# Altium footprint library Cole_.PcbLib: 175 footprints (part 8 of 11)
Each footprint in its own frame and in the unit in brackets; x right, y up, seen from the top. Pads: shape width x height; smd on the part's side, far side on the other; paste and mask are expansions set on the pad; w line width, h text height; cw(c..) or ccw(c..) is an arc to the next point about the centre after c.
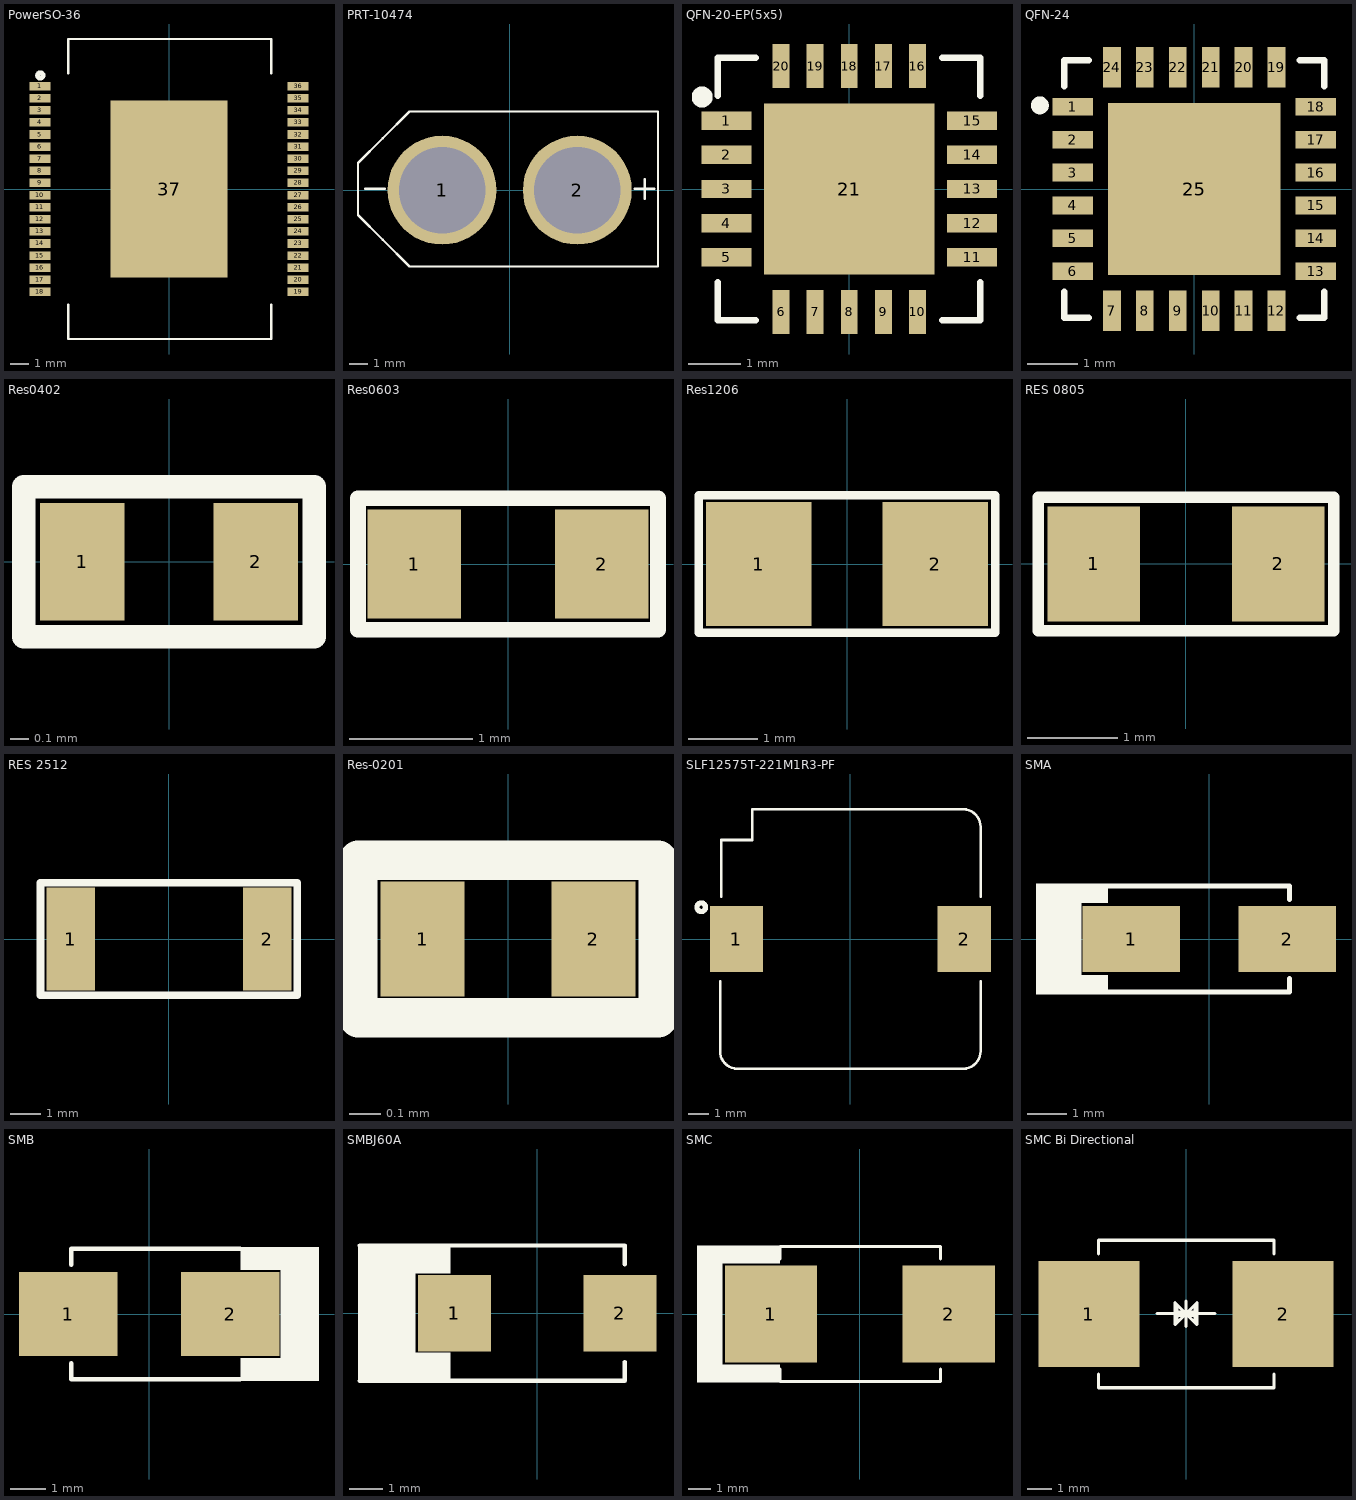
[diagram p7: the footprints below, top view; thin cyan lines are the x and y axes]

## PowerSO-36 [mm]
pads (37):
  rect 1.15x0.46 smd mask+0.055: 1(-6.925,5.525) 2(-6.925,4.875) 3(-6.925,4.225) 4(-6.925,3.575) 5(-6.925,2.925) 6(-6.925,2.275) 7(-6.925,1.625) 8(-6.925,0.975) 9(-6.925,0.325) 10(-6.925,-0.325) 11(-6.925,-0.975) 12(-6.925,-1.625) 13(-6.925,-2.275) 14(-6.925,-2.925) 15(-6.925,-3.575) 16(-6.925,-4.225) 17(-6.925,-4.875) 18(-6.925,-5.525) 19(6.925,-5.525) 20(6.925,-4.875) 21(6.925,-4.225) 22(6.925,-3.575) 23(6.925,-2.925) 24(6.925,-2.275) 25(6.925,-1.625) 26(6.925,-0.975) 27(6.925,-0.325) 28(6.925,0.325) 29(6.925,0.975) 30(6.925,1.625) 31(6.925,2.275) 32(6.925,2.925) 33(6.925,3.575) 34(6.925,4.225) 35(6.925,4.875) 36(6.925,5.525)
  rect 6.3x9.5 smd mask+0.055: 37(0,0)
Top Overlay:
  circle w0.254: c-6.909,6.096 r0.148
  lines w0.127: -5.41,-6.198 -5.41,-8.052 5.486,-8.052 5.486,-6.198 ; -5.41,6.198 -5.41,8.052 5.486,8.052 5.486,6.198
3D body "PowerSO-36_STM.step": height 3.61, standoff 0, extent -7.252,-8.001 7.252,8.001

## PRT-10474 [mm]
pads (2):
  round 5.8 hole 4.6: 1(-3.6,0) 2(3.6,0)
Top Overlay:
  lines w0.127: -7.698,0.076 -6.657,0.076 ; 6.657,0.076 7.698,0.076 ; 7.188,-0.446 7.188,0.596 ; -8.077,-1.321 -6.756,-2.642 -5.334,-4.064 7.899,-4.064 7.899,4.191 -5.334,4.191 -6.756,2.769 -8.077,1.448 -8.077,-1.321
3D body "User Library-XT60 male.step": height 16.3, standoff -4.9, extent -8.051,-4.013 7.849,4.137

## QFN-20-EP(5x5) [mm]
pads (21):
  rect 0.95x0.35 smd: 1(-2.34,1.3) 2(-2.34,0.65) 3(-2.34,0) 4(-2.34,-0.65) 5(-2.34,-1.3) 11(2.34,-1.3) 12(2.34,-0.65) 13(2.34,0) 14(2.34,0.65) 15(2.34,1.3)
  rect 0.32x0.84 smd: 6(-1.3,-2.34) 7(-0.65,-2.34) 8(0,-2.34) 9(0.65,-2.34) 10(1.3,-2.34) 16(1.3,2.34) 17(0.65,2.34) 18(0,2.34) 19(-0.65,2.34) 20(-1.3,2.34)
  rect 3.25x3.25 smd paste-0.595: 21(0,0)
Top Overlay:
  circle w0.2: c-2.801,1.753 r0.1
  lines w0.127: -2.507,-1.78 -2.507,-2.5 -1.787,-2.5 ; -2.507,1.78 -2.507,2.5 -1.787,2.5 ; 1.773,-2.5 2.493,-2.5 2.493,-1.78 ; 1.773,2.5 2.493,2.5 2.493,1.78
3D body "step_temp.STEP": height 0.8, standoff 0, extent -2.5,-2.5 2.5,2.5

## QFN-24 [mm]
pads (25):
  rect 0.8x0.35 smd: 1(-2.4,1.625) 2(-2.4,0.975) 3(-2.4,0.325) 4(-2.4,-0.325) 5(-2.4,-0.975) 6(-2.4,-1.625) 13(2.4,-1.625) 14(2.4,-0.975) 15(2.4,-0.325) 16(2.4,0.325) 17(2.4,0.975) 18(2.4,1.625)
  rect 0.35x0.8 smd: 7(-1.625,-2.4) 8(-0.975,-2.4) 9(-0.325,-2.4) 10(0.325,-2.4) 11(0.975,-2.4) 12(1.625,-2.4) 19(1.625,2.4) 20(0.975,2.4) 21(0.325,2.4) 22(-0.325,2.4) 23(-0.975,2.4) 24(-1.625,2.4)
  rect 3.4x3.4 smd: 25(0,0)
Top Overlay:
  circle w0.2: c-3.048,1.651 r0.076
  lines w0.127: -2.565,-2.032 -2.565,-2.54 -2.083,-2.54 ; -2.565,2.032 -2.565,2.54 -2.083,2.54 ; 2.083,-2.54 2.565,-2.54 2.565,-2.032 ; 2.083,2.54 2.565,2.54 2.565,2.032
3D body "QFN24_BRA.step": height 0.89, standoff 0, extent -2.502,-2.502 2.502,2.502

## Res0402 [mil]
pads (2):
  rect 18x25 smd mask+4: 1(-18.5,0) 2(18.5,0)
Top Overlay:
  lines w0.13: -32,-17 32,-17
  lines w5: -31,-16 31,-16 31,16 -31,16 -31,-16
3D body "User Library-RES_1005-0402.step": height 16.14, standoff 0, extent -22.63,-10.82 22.64,10.83

## Res0603 [mil]
pads (2):
  rect 30x35 smd: 1(-30,0) 2(30,0)
Top Overlay:
  lines w5: -48,-21 48,-21 48,21 -48,21 -48,-21
3D body "User Library-RESC1608X05N.step": height 17.76, standoff 0, extent -30.52,-16.74 30.51,16.73

## Res1206 [mil]
pads (2):
  rect 60x70 smd: 1(-50,0) 2(50,0)
Top Overlay:
  lines w5: -84,-39 -84,39 84,39 84,-39 -84,-39
3D body "User Library-1206 SMD Resistor.step": height 39.45, standoff 0, extent -62.99,-31.49 63,31.51

## RES 0805 [mil] "SMD 0805"
pads (2):
  rect 40x50 smd: 1(-40,0) 2(40,0)
Top Overlay:
  lines w5: -64,-29 -64,29 64,29 64,-29 -64,-29
3D body "User Library-CR2012-0805.STEP": height 23.62, standoff 0, extent -39.34,-24.75 39.4,24.46

## RES 2512 [mm] "0.033O ±1% 2W ±1800ppm/°C 2512 Low Resistors & Current Sense Resistors - Surface Mount RoHS"
pads (2):
  rect 1.6x3.4 smd: 1(-3.25,0) 2(3.25,0)
Top Overlay:
  lines w0.254: -4.242,-1.854 -4.242,1.854 4.237,1.854 4.237,-1.854 -4.242,-1.854
3D body "CircuitWorks-RESISTOR 2512.step": height 0.58, standoff -0.03, extent -3.175,-1.63 3.175,1.63

## Res-0201 [mm]
pads (2):
  rect 0.27x0.37 smd: 1(-0.275,0) 2(0.275,0)
Top Overlay:
  lines w0.127: -0.483,-0.254 -0.483,0.254 0.483,0.254 0.483,-0.254 -0.483,-0.254
3D body "User Library-0201(0603M) Res.step": height 0.29, standoff -0.02, extent -0.305,-0.152 0.305,0.153

## SLF12575T-221M1R3-PF [mm]
pads (2):
  rect 2.6x3.2 smd: 1(-5.55,0) 2(5.55,0)
Top Overlay:
  circle w0.254: c-7.266,1.549 r0.209
  lines w0.127: -6.35,-2.057 -6.35,-5.461 ccw(c-5.499,-5.474) -5.512,-6.325 5.512,-6.325 ccw(c5.499,-5.474) 6.35,-5.461 6.35,-2.057 ; -6.299,2.057 -6.299,4.826 -4.775,4.826 -4.775,6.325 5.512,6.325 cw(c5.499,5.474) 6.35,5.461 6.35,2.057
3D body "slf12575.step": height 7.5, standoff 0, extent -6.275,-6.326 6.325,6.274

## SMA [mm]
pads (2):
  rect 2.5x1.7 smd: 1(-2,0) 2(2,0)
Top Overlay:
  rectangle: -3.3,0.924 -2.596,1.422
  rectangle: -4.445,-1.422 -3.278,1.422
  rectangle: -3.3,-1.422 -2.596,-0.924
  lines w0.127: -2.658,-1.358 2.061,-1.358 2.061,-1.012 ; -2.658,1.358 2.061,1.358 2.061,1.012
3D body "User Library-DO-214AC SMA.step": height 2.4, standoff 0, extent -2.6,-1.3 2.6,1.3

## SMB [mm]
pads (2):
  rect 2.8x2.4 smd: 1(-2.3,0) 2(2.3,0)
Top Overlay:
  rectangle: 2.591,-1.905 4.826,-1.245
  rectangle: 3.734,-1.651 4.826,1.346
  rectangle: 2.591,1.245 4.826,1.905
  lines w0.127: -2.21,-1.397 -2.21,-1.854 2.591,-1.854 ; -2.21,1.397 -2.21,1.854 2.591,1.854
3D body "User Library-DO-214AA SMB.step": height 2.3, standoff 0, extent -2.7,-1.8 2.7,1.8

## SMBJ60A [mm] "TVS DIODE 60V 96.8V DO214AA"
pads (3):
  rect 2.16x2.26 smd: 1(-2.45,0) 1(-2.45,0) 2(2.45,0)
Top Overlay:
  rectangle: -5.309,-2.057 -3.607,2.007
  rectangle: -3.683,1.168 -2.565,2.007
  rectangle: -3.683,-2.007 -2.565,-1.168
  lines w0.127: -5.258,-2.007 2.591,-2.007 2.591,-1.448 ; -5.258,2.007 2.591,2.007 2.591,1.448
3D body "SMBJSeries_LTF.step": height 2.49, standoff 0, extent -2.794,-1.968 2.794,1.968

## SMC [mm]
pads (2):
  rect 4.1x4.3 smd: 1(-3.95,0) 2(3.95,0)
Top Overlay:
  rectangle: -7.239,2.235 -3.556,3.048
  rectangle: -7.239,-3.048 -3.556,-2.235
  rectangle: -7.239,-2.261 -6.096,2.261
  lines w0.127: -3.556,-2.438 -3.556,-2.997 3.581,-2.997 3.581,-2.438 ; -3.556,2.438 -3.556,2.997 3.581,2.997 3.581,2.438
3D body "User Library-DO-214AB-SMC.step": height 2.41, standoff -0.04, extent -3.9,-2.95 3.9,2.95

## SMC Bi Directional [mm]
pads (2):
  rect 4.1x4.3 smd: 1(-3.95,0) 2(3.95,0)
Top Overlay:
  region: 0.356,0.152 0.076,0.152 0.076,-0.127 0.356,-0.127
  rectangle: -0.356,-0.127 -0.076,0.152
  region: 0.457,0.362 0.305,0.362 0.305,-0.305 0.457,-0.305
  rectangle: -0.457,-0.305 -0.305,0.362
  lines w0.127: -3.556,-2.438 -3.556,-2.997 3.581,-2.997 3.581,-2.438 ; -3.556,2.438 -3.556,2.997 3.581,2.997 3.581,2.438 ; -1.181,0.013 -0.445,0.013 ; 0,-0.508 0,0.533 ; 0.445,0.013 1.181,0.013 ; 0,0.013 0.445,-0.432 0.445,0.457 0,0.013 ; 0,0.013 -0.445,-0.432 -0.445,0.457 0,0.013
3D body "User Library-DO-214AB-SMC.step": height 2.41, standoff -0.04, extent -3.9,-2.95 3.9,2.95